# Altium footprint library Buzzer.PcbLib: 1 footprints
Each footprint in its own frame and in the unit in brackets; x right, y up, seen from the top. Pads: shape width x height; smd on the part's side, far side on the other; paste and mask are expansions set on the pad; w line width, h text height; cw(c..) or ccw(c..) is an arc to the next point about the centre after c.
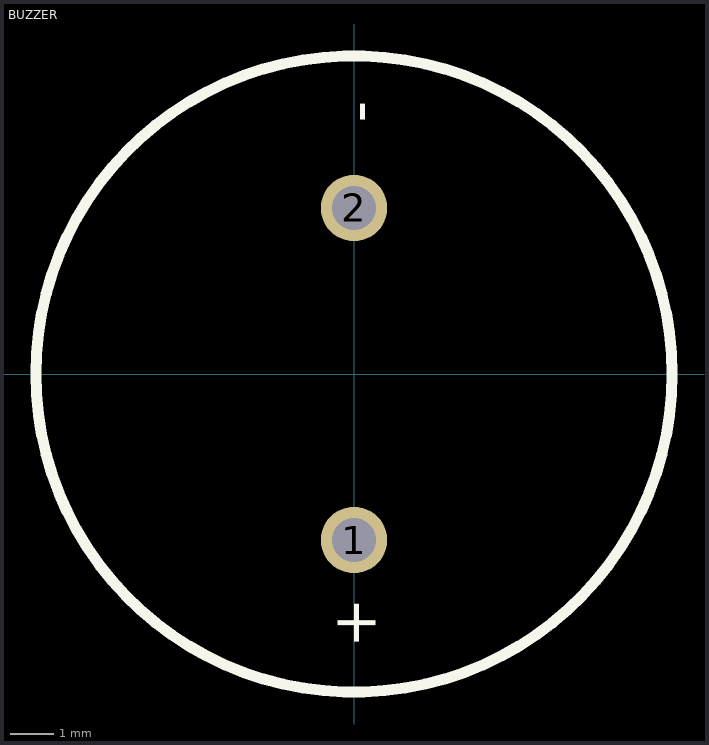
[diagram p0: the footprint, top view; thin cyan lines are the x and y axes]

## BUZZER [mil]
pads (2):
  round 60 hole 40: 1(0,-150) 2(0,150)
Top Overlay:
  circle w10: c0,0 r287.5
  text "-" at 22.99,227 h40
  text "+" at 19.66,-248 h40